# Altium schematic symbol library PR27-5V-S-900-1A-EF.SchLib: 1 symbol
Pins are listed as number, name and electrical type; pins without a type are passive.

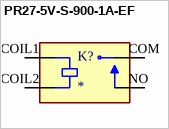
[diagram p0: symbol PR27-5V-S-900-1A-EF]

## PR27-5V-S-900-1A-EF
designator K?
MP: PR27-5V-S-900-1A-EF; Package: None; Price: None; Value: *; Availability: Unavailable
footprint RELAY_PR27-5V-S-900-1A-EF
pins: COIL1, COIL2, COM, NO